# Altium integrated library SMBJ15A.IntLib: 1 symbol
Pins are listed as number, name and electrical type; pins without a type are passive.

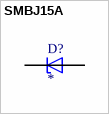
[diagram p0: symbol SMBJ15A]

## SMBJ15A
designator D?
600W, 17.6V, 5%, Unidirectional, TVS; MF: Taiwan Semiconductor; MP: SMBJ15A; SnapEDA_Link: https://www.snapeda.com/parts/SMBJ15A/taiwan/view-part/?ref=snap; Package: SMD-2 Taiwan Semiconductor; Value: *; Check_prices: https://www.snapeda.com/parts/SMBJ15A/taiwan/view-part/?ref=eda
footprint DIOM4336X265N
pins: A, C